# Altium footprint library WR-PHD_Socket Header.PcbLib: 279 footprints (part 17 of 18)
Each footprint in its own frame and in the unit in brackets; x right, y up, seen from the top. Pads: shape width x height; smd on the part's side, far side on the other; paste and mask are expansions set on the pad; w line width, h text height; cw(c..) or ccw(c..) is an arc to the next point about the centre after c.
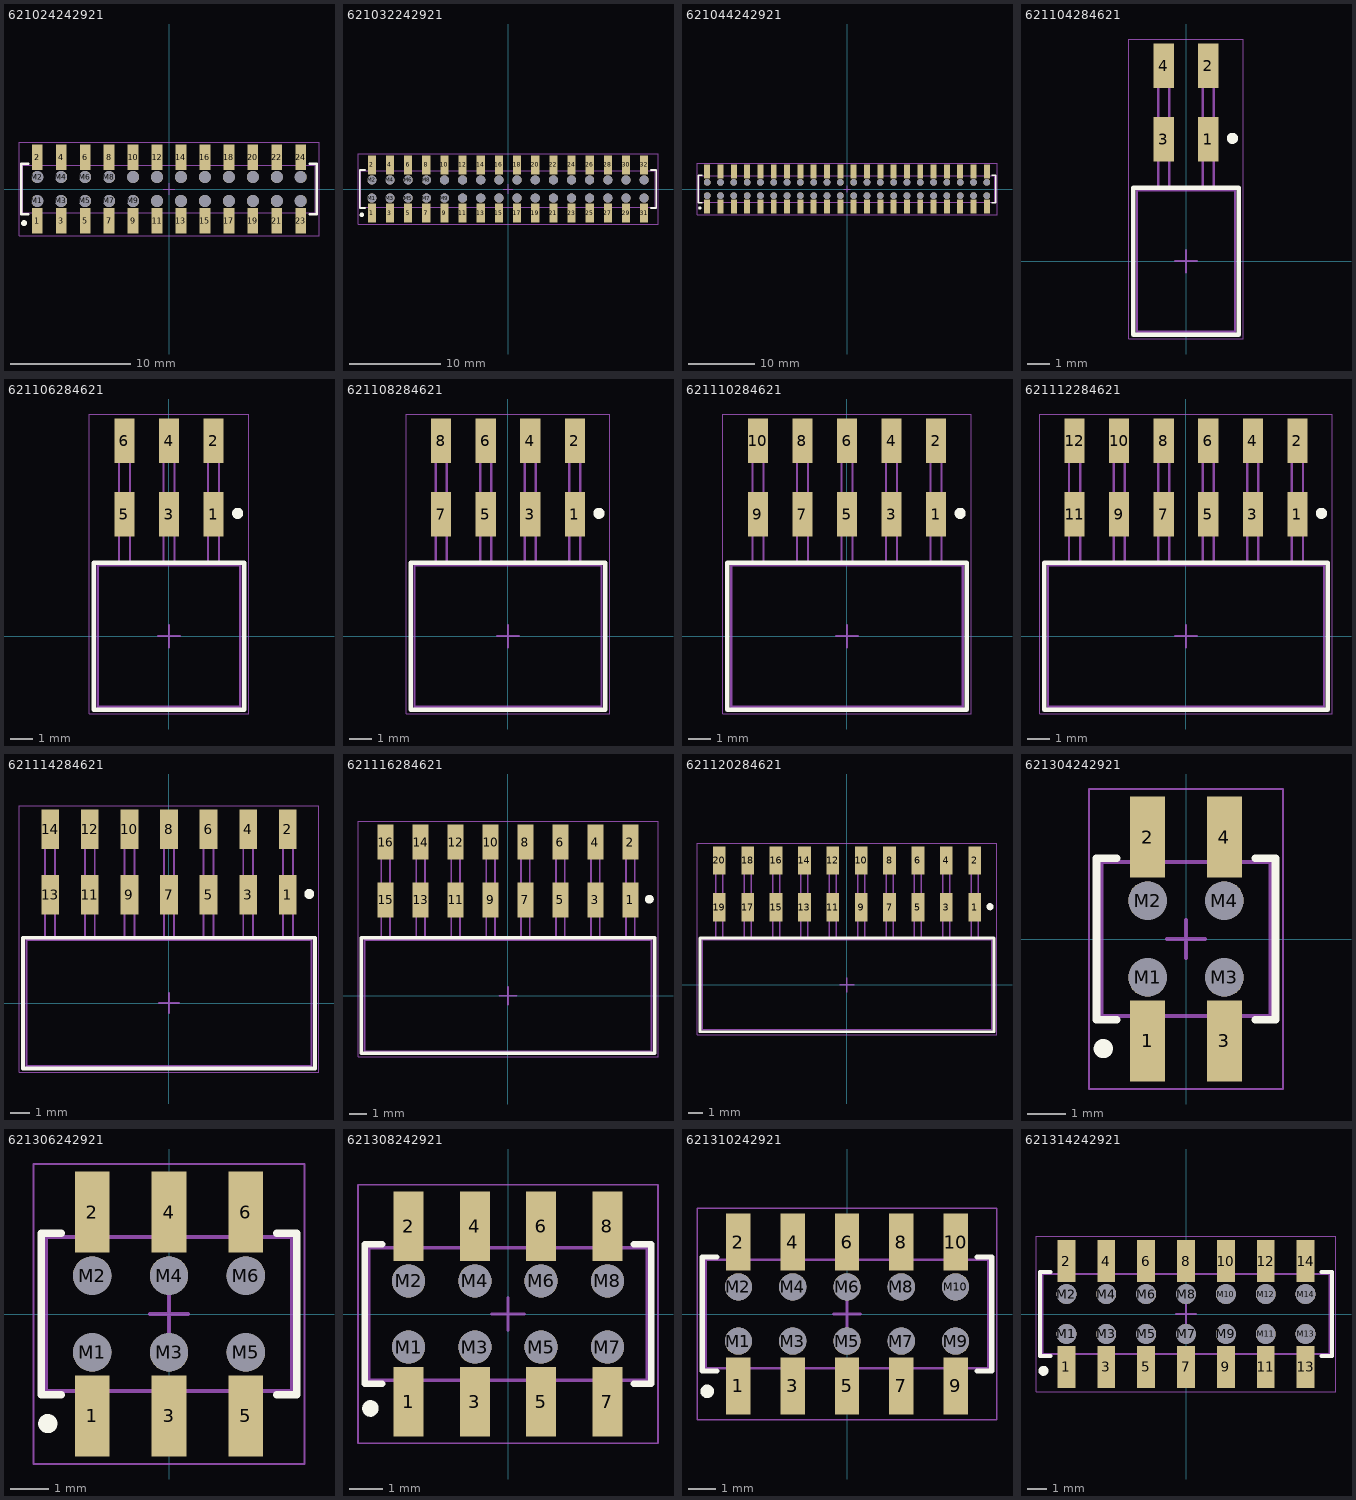
[diagram p16: the footprints below, top view; thin cyan lines are the x and y axes]

## 621024242921 [mm] "Socket Header, Pitch 2.00 mm, SMT, Vertical, dual row, 24p"
height 4.85
pads (48):
  rect 0.9x2.1 smd: 1(-11,-2.65) 2(-11,2.65) 3(-9,-2.65) 4(-9,2.65) 5(-7,-2.65) 6(-7,2.65) 7(-5,-2.65) 8(-5,2.65) 9(-3,-2.65) 10(-3,2.65) 11(-1,-2.65) 12(-1,2.65) 13(1,-2.65) 14(1,2.65) 15(3,-2.65) 16(3,2.65) 17(5,-2.65) 18(5,2.65) 19(7,-2.65) 20(7,2.65) 21(9,-2.65) 22(9,2.65) 23(11,-2.65) 24(11,2.65)
  round 1 hole 1 unplated: M1(-11,-1) M2(-11,1) M3(-9,-1) M4(-9,1) M5(-7,-1) M6(-7,1) M7(-5,-1) M8(-5,1) M9(-3,-1) M10(-3,1) M11(-1,-1) M12(-1,1) M13(1,-1) M14(1,1) M15(3,-1) M16(3,1) M17(5,-1) M18(5,1) M19(7,-1) M20(7,1) M21(9,-1) M22(9,1) M23(11,-1) M24(11,1)
Top Overlay:
  circle w0.25: c-12.1,-2.85 r0.125
  lines w0.2: -11.75,-2.1 -12.325,-2.1 -12.325,2.1 -11.75,2.1 ; 11.75,-2.1 12.325,-2.1 12.325,2.1 11.75,2.1
Top Component Outline:
  lines w0.1: -11.25,-2 -11.25,-3.1 -10.75,-3.1 -10.75,-2 ; -11.25,2 -11.25,3.1 -10.75,3.1 -10.75,2 ; -9.25,-2 -9.25,-3.1 -8.75,-3.1 -8.75,-2 ; -9.25,2 -9.25,3.1 -8.75,3.1 -8.75,2 ; -7.25,-2 -7.25,-3.1 -6.75,-3.1 -6.75,-2 ; -7.25,2 -7.25,3.1 -6.75,3.1 -6.75,2 ; -5.25,-2 -5.25,-3.1 -4.75,-3.1 -4.75,-2 ; -5.25,2 -5.25,3.1 -4.75,3.1 -4.75,2 ; -3.25,-2 -3.25,-3.1 -2.75,-3.1 -2.75,-2 ; -3.25,2 -3.25,3.1 -2.75,3.1 -2.75,2 ; -1.25,-2 -1.25,-3.1 -0.75,-3.1 -0.75,-2 ; -1.25,2 -1.25,3.1 -0.75,3.1 -0.75,2 ; 0.75,-2 0.75,-3.1 1.25,-3.1 1.25,-2 ; 0.75,2 0.75,3.1 1.25,3.1 1.25,2 ; 2.75,-2 2.75,-3.1 3.25,-3.1 3.25,-2 ; 2.75,2 2.75,3.1 3.25,3.1 3.25,2 ; 4.75,-2 4.75,-3.1 5.25,-3.1 5.25,-2 ; 4.75,2 4.75,3.1 5.25,3.1 5.25,2 ; 6.75,-2 6.75,-3.1 7.25,-3.1 7.25,-2 ; 6.75,2 6.75,3.1 7.25,3.1 7.25,2 ; 8.75,-2 8.75,-3.1 9.25,-3.1 9.25,-2 ; 8.75,2 8.75,3.1 9.25,3.1 9.25,2 ; 10.75,-2 10.75,-3.1 11.25,-3.1 11.25,-2 ; 10.75,2 10.75,3.1 11.25,3.1 11.25,2 ; -12.2,-2 12.2,-2 12.2,2 -12.2,2 -12.2,-2
Top Designator:
  text ".Designator" at -3.647,-0.357 h1
Top Courtyard:
  lines w0.05: -12.525,-3.9 -12.525,3.9 12.525,3.9 12.525,-3.9 -12.525,-3.9
Top Component Center:
  lines w0.1: -0.5,0 0.5,0 ; 0,-0.5 0,0.5
3D body "621024242921.stp": height 4.6, standoff 0, extent -12.25,-3.1 12.25,3.1

## 621032242921 [mm] "Socket Header, Pitch 2.00 mm, SMT, Vertical, dual row, 32p"
height 4.85
pads (64):
  rect 0.9x2.1 smd: 1(-15,-2.65) 2(-15,2.65) 3(-13,-2.65) 4(-13,2.65) 5(-11,-2.65) 6(-11,2.65) 7(-9,-2.65) 8(-9,2.65) 9(-7,-2.65) 10(-7,2.65) 11(-5,-2.65) 12(-5,2.65) 13(-3,-2.65) 14(-3,2.65) 15(-1,-2.65) 16(-1,2.65) 17(1,-2.65) 18(1,2.65) 19(3,-2.65) 20(3,2.65) 21(5,-2.65) 22(5,2.65) 23(7,-2.65) 24(7,2.65) 25(9,-2.65) 26(9,2.65) 27(11,-2.65) 28(11,2.65) 29(13,-2.65) 30(13,2.65) 31(15,-2.65) 32(15,2.65)
  round 1 hole 1 unplated: M1(-15,-1) M2(-15,1) M3(-13,-1) M4(-13,1) M5(-11,-1) M6(-11,1) M7(-9,-1) M8(-9,1) M9(-7,-1) M10(-7,1) M11(-5,-1) M12(-5,1) M13(-3,-1) M14(-3,1) M15(-1,-1) M16(-1,1) M17(1,-1) M18(1,1) M19(3,-1) M20(3,1) M21(5,-1) M22(5,1) M23(7,-1) M24(7,1) M25(9,-1) M26(9,1) M27(11,-1) M28(11,1) M29(13,-1) M30(13,1) M31(15,-1) M32(15,1)
Top Overlay:
  circle w0.25: c-16.1,-2.85 r0.125
  lines w0.2: -15.75,-2.1 -16.325,-2.1 -16.325,2.1 -15.75,2.1 ; 15.75,-2.1 16.325,-2.1 16.325,2.1 15.75,2.1
Top Component Outline:
  lines w0.1: -15.25,-2 -15.25,-3.1 -14.75,-3.1 -14.75,-2 ; -15.25,2 -15.25,3.1 -14.75,3.1 -14.75,2 ; -13.25,-2 -13.25,-3.1 -12.75,-3.1 -12.75,-2 ; -13.25,2 -13.25,3.1 -12.75,3.1 -12.75,2 ; -11.25,-2 -11.25,-3.1 -10.75,-3.1 -10.75,-2 ; -11.25,2 -11.25,3.1 -10.75,3.1 -10.75,2 ; -9.25,-2 -9.25,-3.1 -8.75,-3.1 -8.75,-2 ; -9.25,2 -9.25,3.1 -8.75,3.1 -8.75,2 ; -7.25,-2 -7.25,-3.1 -6.75,-3.1 -6.75,-2 ; -7.25,2 -7.25,3.1 -6.75,3.1 -6.75,2 ; -5.25,-2 -5.25,-3.1 -4.75,-3.1 -4.75,-2 ; -5.25,2 -5.25,3.1 -4.75,3.1 -4.75,2 ; -3.25,-2 -3.25,-3.1 -2.75,-3.1 -2.75,-2 ; -3.25,2 -3.25,3.1 -2.75,3.1 -2.75,2 ; -1.25,-2 -1.25,-3.1 -0.75,-3.1 -0.75,-2 ; -1.25,2 -1.25,3.1 -0.75,3.1 -0.75,2 ; 0.75,-2 0.75,-3.1 1.25,-3.1 1.25,-2 ; 0.75,2 0.75,3.1 1.25,3.1 1.25,2 ; 2.75,-2 2.75,-3.1 3.25,-3.1 3.25,-2 ; 2.75,2 2.75,3.1 3.25,3.1 3.25,2 ; 4.75,-2 4.75,-3.1 5.25,-3.1 5.25,-2 ; 4.75,2 4.75,3.1 5.25,3.1 5.25,2 ; 6.75,-2 6.75,-3.1 7.25,-3.1 7.25,-2 ; 6.75,2 6.75,3.1 7.25,3.1 7.25,2 ; 8.75,-2 8.75,-3.1 9.25,-3.1 9.25,-2 ; 8.75,2 8.75,3.1 9.25,3.1 9.25,2 ; 10.75,-2 10.75,-3.1 11.25,-3.1 11.25,-2 ; 10.75,2 10.75,3.1 11.25,3.1 11.25,2 ; 12.75,-2 12.75,-3.1 13.25,-3.1 13.25,-2 ; 12.75,2 12.75,3.1 13.25,3.1 13.25,2 ; 14.75,-2 14.75,-3.1 15.25,-3.1 15.25,-2 ; 14.75,2 14.75,3.1 15.25,3.1 15.25,2 ; -16.2,-2 16.2,-2 16.2,2 -16.2,2 -16.2,-2
Top Designator:
  text ".Designator" at -3.647,-0.357 h1
Top Courtyard:
  lines w0.05: -16.525,-3.9 -16.525,3.9 16.525,3.9 16.525,-3.9 -16.525,-3.9
Top Component Center:
  lines w0.1: -0.5,0 0.5,0 ; 0,-0.5 0,0.5
3D body "621032242921.stp": height 4.6, standoff 0, extent -16.25,-3.1 16.25,3.1

## 621044242921 [mm] "Socket Header, Pitch 2.00 mm, SMT, Vertical, dual row, 44p"
height 4.85
pads (88):
  rect 0.9x2.1 smd: 1(-21,-2.65) 2(-21,2.65) 3(-19,-2.65) 4(-19,2.65) 5(-17,-2.65) 6(-17,2.65) 7(-15,-2.65) 8(-15,2.65) 9(-13,-2.65) 10(-13,2.65) 11(-11,-2.65) 12(-11,2.65) 13(-9,-2.65) 14(-9,2.65) 15(-7,-2.65) 16(-7,2.65) 17(-5,-2.65) 18(-5,2.65) 19(-3,-2.65) 20(-3,2.65) 21(-1,-2.65) 22(-1,2.65) 23(1,-2.65) 24(1,2.65) 25(3,-2.65) 26(3,2.65) 27(5,-2.65) 28(5,2.65) 29(7,-2.65) 30(7,2.65) 31(9,-2.65) 32(9,2.65) 33(11,-2.65) 34(11,2.65) 35(13,-2.65) 36(13,2.65) 37(15,-2.65) 38(15,2.65) 39(17,-2.65) 40(17,2.65) 41(19,-2.65) 42(19,2.65) 43(21,-2.65) 44(21,2.65)
  round 1 hole 1 unplated: M1(-21,-1) M2(-21,1) M3(-19,-1) M4(-19,1) M5(-17,-1) M6(-17,1) M7(-15,-1) M8(-15,1) M9(-13,-1) M10(-13,1) M11(-11,-1) M12(-11,1) M13(-9,-1) M14(-9,1) M15(-7,-1) M16(-7,1) M17(-5,-1) M18(-5,1) M19(-3,-1) M20(-3,1) M21(-1,-1) M22(-1,1) M23(1,-1) M24(1,1) M25(3,-1) M26(3,1) M27(5,-1) M28(5,1) M29(7,-1) M30(7,1) M31(9,-1) M32(9,1) M33(11,-1) M34(11,1) M35(13,-1) M36(13,1) M37(15,-1) M38(15,1) M39(17,-1) M40(17,1) M41(19,-1) M42(19,1) M43(21,-1) M44(21,1)
Top Overlay:
  circle w0.25: c-22.1,-2.85 r0.125
  lines w0.2: -21.75,-2.1 -22.325,-2.1 -22.325,2.1 -21.75,2.1 ; 21.75,-2.1 22.325,-2.1 22.325,2.1 21.75,2.1
Top Component Outline:
  lines w0.1: -21.25,-2 -21.25,-3.1 -20.75,-3.1 -20.75,-2 ; -21.25,2 -21.25,3.1 -20.75,3.1 -20.75,2 ; -19.25,-2 -19.25,-3.1 -18.75,-3.1 -18.75,-2 ; -19.25,2 -19.25,3.1 -18.75,3.1 -18.75,2 ; -17.25,-2 -17.25,-3.1 -16.75,-3.1 -16.75,-2 ; -17.25,2 -17.25,3.1 -16.75,3.1 -16.75,2 ; -15.25,-2 -15.25,-3.1 -14.75,-3.1 -14.75,-2 ; -15.25,2 -15.25,3.1 -14.75,3.1 -14.75,2 ; -13.25,-2 -13.25,-3.1 -12.75,-3.1 -12.75,-2 ; -13.25,2 -13.25,3.1 -12.75,3.1 -12.75,2 ; -11.25,-2 -11.25,-3.1 -10.75,-3.1 -10.75,-2 ; -11.25,2 -11.25,3.1 -10.75,3.1 -10.75,2 ; -9.25,-2 -9.25,-3.1 -8.75,-3.1 -8.75,-2 ; -9.25,2 -9.25,3.1 -8.75,3.1 -8.75,2 ; -7.25,-2 -7.25,-3.1 -6.75,-3.1 -6.75,-2 ; -7.25,2 -7.25,3.1 -6.75,3.1 -6.75,2 ; -5.25,-2 -5.25,-3.1 -4.75,-3.1 -4.75,-2 ; -5.25,2 -5.25,3.1 -4.75,3.1 -4.75,2 ; -3.25,-2 -3.25,-3.1 -2.75,-3.1 -2.75,-2 ; -3.25,2 -3.25,3.1 -2.75,3.1 -2.75,2 ; -1.25,-2 -1.25,-3.1 -0.75,-3.1 -0.75,-2 ; -1.25,2 -1.25,3.1 -0.75,3.1 -0.75,2 ; 0.75,-2 0.75,-3.1 1.25,-3.1 1.25,-2 ; 0.75,2 0.75,3.1 1.25,3.1 1.25,2 ; 2.75,-2 2.75,-3.1 3.25,-3.1 3.25,-2 ; 2.75,2 2.75,3.1 3.25,3.1 3.25,2 ; 4.75,-2 4.75,-3.1 5.25,-3.1 5.25,-2 ; 4.75,2 4.75,3.1 5.25,3.1 5.25,2 ; 6.75,-2 6.75,-3.1 7.25,-3.1 7.25,-2 ; 6.75,2 6.75,3.1 7.25,3.1 7.25,2 ; 8.75,-2 8.75,-3.1 9.25,-3.1 9.25,-2 ; 8.75,2 8.75,3.1 9.25,3.1 9.25,2 ; 10.75,-2 10.75,-3.1 11.25,-3.1 11.25,-2 ; 10.75,2 10.75,3.1 11.25,3.1 11.25,2 ; 12.75,-2 12.75,-3.1 13.25,-3.1 13.25,-2 ; 12.75,2 12.75,3.1 13.25,3.1 13.25,2 ; 14.75,-2 14.75,-3.1 15.25,-3.1 15.25,-2 ; 14.75,2 14.75,3.1 15.25,3.1 15.25,2 ; 16.75,-2 16.75,-3.1 17.25,-3.1 17.25,-2 ; 16.75,2 16.75,3.1 17.25,3.1 17.25,2 ; 18.75,-2 18.75,-3.1 19.25,-3.1 19.25,-2 ; 18.75,2 18.75,3.1 19.25,3.1 19.25,2 ; 20.75,-2 20.75,-3.1 21.25,-3.1 21.25,-2 ; 20.75,2 20.75,3.1 21.25,3.1 21.25,2 ; -22.2,-2 22.2,-2 22.2,2 -22.2,2 -22.2,-2
Top Designator:
  text ".Designator" at -3.647,-0.357 h1
Top Courtyard:
  lines w0.05: -22.525,-3.9 -22.525,3.9 22.525,3.9 22.525,-3.9 -22.525,-3.9
Top Component Center:
  lines w0.1: -0.5,0 0.5,0 ; 0,-0.5 0,0.5
3D body "621044242921.stp": height 4.6, standoff 0, extent -22.25,-3.1 22.25,3.1

## 621104284621 [mm] "Socket Header, Pitch 2.00 mm, SMT, Angled, dual row, 4p"
height 4.15
pads (4):
  rect 0.9x2 smd: 1(1,5.475) 2(1,8.775) 3(-1,5.475) 4(-1,8.775)
Top Overlay:
  circle w0.25: c2.084,5.514 r0.125
  lines w0.2: -2.375,-3.3 -2.375,3.3 2.375,3.3 2.375,-3.3 -2.375,-3.3
Top Component Outline:
  lines w0.1: -1.25,3.175 -1.25,9.275 -0.75,9.275 -0.75,3.175 ; -1.25,5.975 -0.75,5.975 ; 0.75,3.175 0.75,9.275 1.25,9.275 1.25,3.175 ; 0.75,5.975 1.25,5.975 ; -2.2,-3.175 2.2,-3.175 2.2,3.175 -2.2,3.175 -2.2,-3.175
Top Designator:
  text ".Designator" at -3.647,-0.357 h1
Top Courtyard:
  lines w0.05: -2.575,-3.5 -2.575,9.975 2.575,9.975 2.575,-3.5 -2.575,-3.5
Top Component Center:
  lines w0.1: -0.5,0 0.5,0 ; 0,-0.5 0,0.5
3D body "621104284621.stp": height 4.05, standoff 0.05, extent -2.15,-3.175 2.15,9.275

## 621106284621 [mm] "Socket Header, Pitch 2.00 mm, SMT, Angled, dual row, 6p"
height 4.15
pads (6):
  rect 0.9x2 smd: 1(2,5.475) 2(2,8.775) 3(0,5.475) 4(0,8.775) 5(-2,5.475) 6(-2,8.775)
Top Overlay:
  circle w0.25: c3.084,5.514 r0.125
  lines w0.2: -3.375,-3.3 -3.375,3.3 3.375,3.3 3.375,-3.3 -3.375,-3.3
Top Component Outline:
  lines w0.1: -2.25,3.175 -2.25,9.275 -1.75,9.275 -1.75,3.175 ; -2.25,5.975 -1.75,5.975 ; -0.25,3.175 -0.25,9.275 0.25,9.275 0.25,3.175 ; -0.25,5.975 0.25,5.975 ; 1.75,3.175 1.75,9.275 2.25,9.275 2.25,3.175 ; 1.75,5.975 2.25,5.975 ; -3.2,-3.175 3.2,-3.175 3.2,3.175 -3.2,3.175 -3.2,-3.175
Top Designator:
  text ".Designator" at -3.647,-0.357 h1
Top Courtyard:
  lines w0.05: -3.575,-3.5 -3.575,9.975 3.575,9.975 3.575,-3.5 -3.575,-3.5
Top Component Center:
  lines w0.1: -0.5,0 0.5,0 ; 0,-0.5 0,0.5
3D body "621106284621.stp": height 4.05, standoff 0.05, extent -3.15,-3.175 3.15,9.275

## 621108284621 [mm] "Socket Header, Pitch 2.00 mm, SMT, Angled, dual row, 8p"
height 4.15
pads (8):
  rect 0.9x2 smd: 1(3,5.475) 2(3,8.775) 3(1,5.475) 4(1,8.775) 5(-1,5.475) 6(-1,8.775) 7(-3,5.475) 8(-3,8.775)
Top Overlay:
  circle w0.25: c4.084,5.514 r0.125
  lines w0.2: -4.375,-3.3 -4.375,3.3 4.375,3.3 4.375,-3.3 -4.375,-3.3
Top Component Outline:
  lines w0.1: -3.25,3.175 -3.25,9.275 -2.75,9.275 -2.75,3.175 ; -3.25,5.975 -2.75,5.975 ; -1.25,3.175 -1.25,9.275 -0.75,9.275 -0.75,3.175 ; -1.25,5.975 -0.75,5.975 ; 0.75,3.175 0.75,9.275 1.25,9.275 1.25,3.175 ; 0.75,5.975 1.25,5.975 ; 2.75,3.175 2.75,9.275 3.25,9.275 3.25,3.175 ; 2.75,5.975 3.25,5.975 ; -4.2,-3.175 4.2,-3.175 4.2,3.175 -4.2,3.175 -4.2,-3.175
Top Designator:
  text ".Designator" at -3.647,-0.357 h1
Top Courtyard:
  lines w0.05: -4.575,-3.5 -4.575,9.975 4.575,9.975 4.575,-3.5 -4.575,-3.5
Top Component Center:
  lines w0.1: -0.5,0 0.5,0 ; 0,-0.5 0,0.5
3D body "621108284621.stp": height 4.05, standoff 0.05, extent -4.15,-3.175 4.15,9.275

## 621110284621 [mm] "Socket Header, Pitch 2.00 mm, SMT, Angled, dual row, 10p"
height 4.15
pads (10):
  rect 0.9x2 smd: 1(4,5.475) 2(4,8.775) 3(2,5.475) 4(2,8.775) 5(0,5.475) 6(0,8.775) 7(-2,5.475) 8(-2,8.775) 9(-4,5.475) 10(-4,8.775)
Top Overlay:
  circle w0.25: c5.084,5.514 r0.125
  lines w0.2: -5.375,-3.3 -5.375,3.3 5.375,3.3 5.375,-3.3 -5.375,-3.3
Top Component Outline:
  lines w0.1: -4.25,3.175 -4.25,9.275 -3.75,9.275 -3.75,3.175 ; -4.25,5.975 -3.75,5.975 ; -2.25,3.175 -2.25,9.275 -1.75,9.275 -1.75,3.175 ; -2.25,5.975 -1.75,5.975 ; -0.25,3.175 -0.25,9.275 0.25,9.275 0.25,3.175 ; -0.25,5.975 0.25,5.975 ; 1.75,3.175 1.75,9.275 2.25,9.275 2.25,3.175 ; 1.75,5.975 2.25,5.975 ; 3.75,3.175 3.75,9.275 4.25,9.275 4.25,3.175 ; 3.75,5.975 4.25,5.975 ; -5.2,-3.175 -5.2,3.175 5.2,3.175 5.2,-3.175 -5.2,-3.175
Top Designator:
  text ".Designator" at -3.647,-0.357 h1
Top Courtyard:
  lines w0.05: -5.575,-3.5 -5.575,9.975 5.575,9.975 5.575,-3.5 -5.575,-3.5
Top Component Center:
  lines w0.1: -0.5,0 0.5,0 ; 0,-0.5 0,0.5
3D body "621110284621.stp": height 4.05, standoff 0.05, extent -5.15,-3.175 5.15,9.275

## 621112284621 [mm] "Socket Header, Pitch 2.00 mm, SMT, Angled, dual row, 12p"
height 4.15
pads (12):
  rect 0.9x2 smd: 1(5,5.475) 2(5,8.775) 3(3,5.475) 4(3,8.775) 5(1,5.475) 6(1,8.775) 7(-1,5.475) 8(-1,8.775) 9(-3,5.475) 10(-3,8.775) 11(-5,5.475) 12(-5,8.775)
Top Overlay:
  circle w0.25: c6.084,5.514 r0.125
  lines w0.2: -6.375,-3.3 -6.375,3.3 6.375,3.3 6.375,-3.3 -6.375,-3.3
Top Component Outline:
  lines w0.1: -5.25,3.175 -5.25,9.275 -4.75,9.275 -4.75,3.175 ; -5.25,5.975 -4.75,5.975 ; -3.25,3.175 -3.25,9.275 -2.75,9.275 -2.75,3.175 ; -3.25,5.975 -2.75,5.975 ; -1.25,3.175 -1.25,9.275 -0.75,9.275 -0.75,3.175 ; -1.25,5.975 -0.75,5.975 ; 0.75,3.175 0.75,9.275 1.25,9.275 1.25,3.175 ; 0.75,5.975 1.25,5.975 ; 2.75,3.175 2.75,9.275 3.25,9.275 3.25,3.175 ; 2.75,5.975 3.25,5.975 ; 4.75,3.175 4.75,9.275 5.25,9.275 5.25,3.175 ; 4.75,5.975 5.25,5.975 ; -6.2,-3.175 -6.2,3.175 6.2,3.175 6.2,-3.175 -6.2,-3.175
Top Designator:
  text ".Designator" at -3.647,-0.357 h1
Top Courtyard:
  lines w0.05: -6.575,-3.5 -6.575,9.975 6.575,9.975 6.575,-3.5 -6.575,-3.5
Top Component Center:
  lines w0.1: -0.5,0 0.5,0 ; 0,-0.5 0,0.5
3D body "621112284621.stp": height 4.05, standoff 0.05, extent -6.15,-3.175 6.15,9.275

## 621114284621 [mm] "Socket Header, Pitch 2.00 mm, SMT, Angled, dual row, 14p"
height 4.15
pads (14):
  rect 0.9x2 smd: 1(6,5.475) 2(6,8.775) 3(4,5.475) 4(4,8.775) 5(2,5.475) 6(2,8.775) 7(0,5.475) 8(0,8.775) 9(-2,5.475) 10(-2,8.775) 11(-4,5.475) 12(-4,8.775) 13(-6,5.475) 14(-6,8.775)
Top Overlay:
  circle w0.25: c7.084,5.514 r0.125
  lines w0.2: -7.375,-3.3 -7.375,3.3 7.375,3.3 7.375,-3.3 -7.375,-3.3
Top Component Outline:
  lines w0.1: -6.25,3.175 -6.25,9.275 -5.75,9.275 -5.75,3.175 ; -6.25,5.975 -5.75,5.975 ; -4.25,3.175 -4.25,9.275 -3.75,9.275 -3.75,3.175 ; -4.25,5.975 -3.75,5.975 ; -2.25,3.175 -2.25,9.275 -1.75,9.275 -1.75,3.175 ; -2.25,5.975 -1.75,5.975 ; -0.25,3.175 -0.25,9.275 0.25,9.275 0.25,3.175 ; -0.25,5.975 0.25,5.975 ; 1.75,3.175 1.75,9.275 2.25,9.275 2.25,3.175 ; 1.75,5.975 2.25,5.975 ; 3.75,3.175 3.75,9.275 4.25,9.275 4.25,3.175 ; 3.75,5.975 4.25,5.975 ; 5.75,3.175 5.75,9.275 6.25,9.275 6.25,3.175 ; 5.75,5.975 6.25,5.975 ; -7.2,-3.175 -7.2,3.175 7.2,3.175 7.2,-3.175 -7.2,-3.175
Top Designator:
  text ".Designator" at -3.647,-0.357 h1
Top Courtyard:
  lines w0.05: -7.575,-3.5 -7.575,9.975 7.575,9.975 7.575,-3.5 -7.575,-3.5
Top Component Center:
  lines w0.1: -0.5,0 0.5,0 ; 0,-0.5 0,0.5
3D body "621114284621.stp": height 4.05, standoff 0.05, extent -7.15,-3.175 7.15,9.275

## 621116284621 [mm] "Socket Header, Pitch 2.00 mm, SMT, Angled, dual row, 16p"
height 4.15
pads (16):
  rect 0.9x2 smd: 1(7,5.475) 2(7,8.775) 3(5,5.475) 4(5,8.775) 5(3,5.475) 6(3,8.775) 7(1,5.475) 8(1,8.775) 9(-1,5.475) 10(-1,8.775) 11(-3,5.475) 12(-3,8.775) 13(-5,5.475) 14(-5,8.775) 15(-7,5.475) 16(-7,8.775)
Top Overlay:
  circle w0.25: c8.084,5.514 r0.125
  lines w0.2: -8.375,-3.3 -8.375,3.3 8.375,3.3 8.375,-3.3 -8.375,-3.3
Top Component Outline:
  lines w0.1: -7.25,3.175 -7.25,9.275 -6.75,9.275 -6.75,3.175 ; -7.25,5.975 -6.75,5.975 ; -5.25,3.175 -5.25,9.275 -4.75,9.275 -4.75,3.175 ; -5.25,5.975 -4.75,5.975 ; -3.25,3.175 -3.25,9.275 -2.75,9.275 -2.75,3.175 ; -3.25,5.975 -2.75,5.975 ; -1.25,3.175 -1.25,9.275 -0.75,9.275 -0.75,3.175 ; -1.25,5.975 -0.75,5.975 ; 0.75,3.175 0.75,9.275 1.25,9.275 1.25,3.175 ; 0.75,5.975 1.25,5.975 ; 2.75,3.175 2.75,9.275 3.25,9.275 3.25,3.175 ; 2.75,5.975 3.25,5.975 ; 4.75,3.175 4.75,9.275 5.25,9.275 5.25,3.175 ; 4.75,5.975 5.25,5.975 ; 6.75,3.175 6.75,9.275 7.25,9.275 7.25,3.175 ; 6.75,5.975 7.25,5.975 ; -8.2,-3.175 -8.2,3.175 8.2,3.175 8.2,-3.175 -8.2,-3.175
Top Designator:
  text ".Designator" at -3.647,-0.357 h1
Top Courtyard:
  lines w0.05: -8.575,-3.5 -8.575,9.975 8.575,9.975 8.575,-3.5 -8.575,-3.5
Top Component Center:
  lines w0.1: -0.5,0 0.5,0 ; 0,-0.5 0,0.5
3D body "621116284621.stp": height 4.05, standoff 0.05, extent -8.15,-3.175 8.15,9.275

## 621120284621 [mm] "Socket Header, Pitch 2.00 mm, SMT, Angled, dual row, 20p"
height 4.15
pads (20):
  rect 0.9x2 smd: 1(9,5.475) 2(9,8.775) 3(7,5.475) 4(7,8.775) 5(5,5.475) 6(5,8.775) 7(3,5.475) 8(3,8.775) 9(1,5.475) 10(1,8.775) 11(-1,5.475) 12(-1,8.775) 13(-3,5.475) 14(-3,8.775) 15(-5,5.475) 16(-5,8.775) 17(-7,5.475) 18(-7,8.775) 19(-9,5.475) 20(-9,8.775)
Top Overlay:
  circle w0.25: c10.084,5.514 r0.125
  lines w0.2: -10.375,-3.3 -10.375,3.3 10.375,3.3 10.375,-3.3 -10.375,-3.3
Top Component Outline:
  lines w0.1: -9.25,3.175 -9.25,9.275 -8.75,9.275 -8.75,3.175 ; -9.25,5.975 -8.75,5.975 ; -7.25,3.175 -7.25,9.275 -6.75,9.275 -6.75,3.175 ; -7.25,5.975 -6.75,5.975 ; -5.25,3.175 -5.25,9.275 -4.75,9.275 -4.75,3.175 ; -5.25,5.975 -4.75,5.975 ; -3.25,3.175 -3.25,9.275 -2.75,9.275 -2.75,3.175 ; -3.25,5.975 -2.75,5.975 ; -1.25,3.175 -1.25,9.275 -0.75,9.275 -0.75,3.175 ; -1.25,5.975 -0.75,5.975 ; 0.75,3.175 0.75,9.275 1.25,9.275 1.25,3.175 ; 0.75,5.975 1.25,5.975 ; 2.75,3.175 2.75,9.275 3.25,9.275 3.25,3.175 ; 2.75,5.975 3.25,5.975 ; 4.75,3.175 4.75,9.275 5.25,9.275 5.25,3.175 ; 4.75,5.975 5.25,5.975 ; 6.75,3.175 6.75,9.275 7.25,9.275 7.25,3.175 ; 6.75,5.975 7.25,5.975 ; 8.75,3.175 8.75,9.275 9.25,9.275 9.25,3.175 ; 8.75,5.975 9.25,5.975 ; -10.2,-3.175 -10.2,3.175 10.2,3.175 10.2,-3.175 -10.2,-3.175
Top Designator:
  text ".Designator" at -3.647,-0.357 h1
Top Courtyard:
  lines w0.05: -10.575,-3.5 -10.575,9.975 10.575,9.975 10.575,-3.5 -10.575,-3.5
Top Component Center:
  lines w0.1: -0.5,0 0.5,0 ; 0,-0.5 0,0.5
3D body "621120284621.stp": height 4.05, standoff 0.05, extent -10.15,-3.175 10.15,9.275

## 621304242921 [mm] "Socket Header, Pitch 2.00 mm, SMT, Vertical, dual row, 4p"
height 4.85
pads (8):
  rect 0.9x2.1 smd: 1(-1,-2.65) 2(-1,2.65) 3(1,-2.65) 4(1,2.65)
  round 1 hole 1 unplated: M1(-1,-1) M2(-1,1) M3(1,-1) M4(1,1)
Top Overlay:
  circle w0.25: c-2.15,-2.85 r0.125
  lines w0.2: -1.8,-2.1 -2.325,-2.1 -2.325,2.1 -1.8,2.1 ; 1.8,-2.1 2.325,-2.1 2.325,2.1 1.8,2.1
Top Component Outline:
  lines w0.1: -1.25,-2 -1.25,-3.1 -0.75,-3.1 -0.75,-2 ; -1.25,2 -1.25,3.1 -0.75,3.1 -0.75,2 ; 0.75,-2 0.75,-3.1 1.25,-3.1 1.25,-2 ; 0.75,2 0.75,3.1 1.25,3.1 1.25,2 ; -2.2,-2 2.2,-2 2.2,2 -2.2,2 -2.2,-2
Top Designator:
  text ".Designator" at -3.647,-0.357 h1
Top Courtyard:
  lines w0.05: -2.525,-3.9 -2.525,3.9 2.525,3.9 2.525,-3.9 -2.525,-3.9
Top Component Center:
  lines w0.1: -0.5,0 0.5,0 ; 0,-0.5 0,0.5
3D body "621304242921.stp": height 4.6, standoff 0, extent -2.25,-3.1 2.25,3.1

## 621306242921 [mm] "Socket Header, Pitch 2.00 mm, SMT, Vertical, dual row, 6p"
height 4.85
pads (12):
  rect 0.9x2.1 smd: 1(-2,-2.65) 2(-2,2.65) 3(0,-2.65) 4(0,2.65) 5(2,-2.65) 6(2,2.65)
  round 1 hole 1 unplated: M1(-2,-1) M2(-2,1) M3(0,-1) M4(0,1) M5(2,-1) M6(2,1)
Top Overlay:
  circle w0.25: c-3.15,-2.85 r0.125
  lines w0.2: -2.8,-2.1 -3.325,-2.1 -3.325,2.1 -2.8,2.1 ; 2.8,-2.1 3.325,-2.1 3.325,2.1 2.8,2.1
Top Component Outline:
  lines w0.1: -2.25,-2 -2.25,-3.1 -1.75,-3.1 -1.75,-2 ; -2.25,2 -2.25,3.1 -1.75,3.1 -1.75,2 ; -0.25,-2 -0.25,-3.1 0.25,-3.1 0.25,-2 ; -0.25,2 -0.25,3.1 0.25,3.1 0.25,2 ; 1.75,-2 1.75,-3.1 2.25,-3.1 2.25,-2 ; 1.75,2 1.75,3.1 2.25,3.1 2.25,2 ; -3.2,-2 -3.2,2 3.2,2 3.2,-2 -3.2,-2
Top Designator:
  text ".Designator" at -3.647,-0.357 h1
Top Courtyard:
  lines w0.05: -3.525,-3.9 3.525,-3.9 3.525,3.9 -3.525,3.9 -3.525,-3.9
Top Component Center:
  lines w0.1: -0.5,0 0.5,0 ; 0,-0.5 0,0.5
3D body "621306242921.stp": height 4.6, standoff 0, extent -3.25,-3.1 3.25,3.1

## 621308242921 [mm] "Socket Header, Pitch 2.00 mm, SMT, Vertical, dual row, 8p"
height 4.85
pads (16):
  rect 0.9x2.1 smd: 1(-3,-2.65) 2(-3,2.65) 3(-1,-2.65) 4(-1,2.65) 5(1,-2.65) 6(1,2.65) 7(3,-2.65) 8(3,2.65)
  round 1 hole 1 unplated: M1(-3,-1) M2(-3,1) M3(-1,-1) M4(-1,1) M5(1,-1) M6(1,1) M7(3,-1) M8(3,1)
Top Overlay:
  circle w0.25: c-4.15,-2.85 r0.125
  lines w0.2: -3.8,-2.1 -4.325,-2.1 -4.325,2.1 -3.8,2.1 ; 3.8,-2.1 4.325,-2.1 4.325,2.1 3.8,2.1
Top Component Outline:
  lines w0.1: -3.25,-2 -3.25,-3.1 -2.75,-3.1 -2.75,-2 ; -3.25,2 -3.25,3.1 -2.75,3.1 -2.75,2 ; -1.25,-2 -1.25,-3.1 -0.75,-3.1 -0.75,-2 ; -1.25,2 -1.25,3.1 -0.75,3.1 -0.75,2 ; 0.75,-2 0.75,-3.1 1.25,-3.1 1.25,-2 ; 0.75,2 0.75,3.1 1.25,3.1 1.25,2 ; 2.75,-2 2.75,-3.1 3.25,-3.1 3.25,-2 ; 2.75,2 2.75,3.1 3.25,3.1 3.25,2 ; -4.2,-2 4.2,-2 4.2,2 -4.2,2 -4.2,-2
Top Designator:
  text ".Designator" at -3.647,-0.357 h1
Top Courtyard:
  lines w0.05: -4.525,-3.9 -4.525,3.9 4.525,3.9 4.525,-3.9 -4.525,-3.9
Top Component Center:
  lines w0.1: -0.5,0 0.5,0 ; 0,-0.5 0,0.5
3D body "621308242921.stp": height 4.6, standoff 0, extent -4.25,-3.1 4.25,3.1

## 621310242921 [mm] "Socket Header, Pitch 2.00 mm, SMT, Vertical, dual row, 10p"
height 4.85
pads (20):
  rect 0.9x2.1 smd: 1(-4,-2.65) 2(-4,2.65) 3(-2,-2.65) 4(-2,2.65) 5(0,-2.65) 6(0,2.65) 7(2,-2.65) 8(2,2.65) 9(4,-2.65) 10(4,2.65)
  round 1 hole 1 unplated: M1(-4,-1) M2(-4,1) M3(-2,-1) M4(-2,1) M5(0,-1) M6(0,1) M7(2,-1) M8(2,1) M9(4,-1) M10(4,1)
Top Overlay:
  circle w0.25: c-5.15,-2.85 r0.125
  lines w0.2: -4.8,-2.1 -5.325,-2.1 -5.325,2.1 -4.8,2.1 ; 4.8,-2.1 5.325,-2.1 5.325,2.1 4.8,2.1
Top Component Outline:
  lines w0.1: -4.25,-2 -4.25,-3.1 -3.75,-3.1 -3.75,-2 ; -4.25,2 -4.25,3.1 -3.75,3.1 -3.75,2 ; -2.25,-2 -2.25,-3.1 -1.75,-3.1 -1.75,-2 ; -2.25,2 -2.25,3.1 -1.75,3.1 -1.75,2 ; -0.25,-2 -0.25,-3.1 0.25,-3.1 0.25,-2 ; -0.25,2 -0.25,3.1 0.25,3.1 0.25,2 ; 1.75,-2 1.75,-3.1 2.25,-3.1 2.25,-2 ; 1.75,2 1.75,3.1 2.25,3.1 2.25,2 ; 3.75,-2 3.75,-3.1 4.25,-3.1 4.25,-2 ; 3.75,2 3.75,3.1 4.25,3.1 4.25,2 ; -5.2,-2 5.2,-2 5.2,2 -5.2,2 -5.2,-2
Top Designator:
  text ".Designator" at -3.647,-0.357 h1
Top Courtyard:
  lines w0.05: -5.525,-3.9 -5.525,3.9 5.525,3.9 5.525,-3.9 -5.525,-3.9
Top Component Center:
  lines w0.1: -0.5,0 0.5,0 ; 0,-0.5 0,0.5
3D body "621310242921.stp": height 4.6, standoff 0, extent -5.25,-3.1 5.25,3.1

## 621314242921 [mm] "Socket Header, Pitch 2.00 mm, SMT, Vertical, dual row, 14p"
height 4.85
pads (28):
  rect 0.9x2.1 smd: 1(-6,-2.65) 2(-6,2.65) 3(-4,-2.65) 4(-4,2.65) 5(-2,-2.65) 6(-2,2.65) 7(0,-2.65) 8(0,2.65) 9(2,-2.65) 10(2,2.65) 11(4,-2.65) 12(4,2.65) 13(6,-2.65) 14(6,2.65)
  round 1 hole 1 unplated: M1(-6,-1) M2(-6,1) M3(-4,-1) M4(-4,1) M5(-2,-1) M6(-2,1) M7(0,-1) M8(0,1) M9(2,-1) M10(2,1) M11(4,-1) M12(4,1) M13(6,-1) M14(6,1)
Top Overlay:
  circle w0.25: c-7.15,-2.85 r0.125
  lines w0.2: -6.8,-2.1 -7.325,-2.1 -7.325,2.1 -6.8,2.1 ; 6.8,-2.1 7.325,-2.1 7.325,2.1 6.8,2.1
Top Component Outline:
  lines w0.1: -6.25,-2 -6.25,-3.1 -5.75,-3.1 -5.75,-2 ; -6.25,2 -6.25,3.1 -5.75,3.1 -5.75,2 ; -4.25,-2 -4.25,-3.1 -3.75,-3.1 -3.75,-2 ; -4.25,2 -4.25,3.1 -3.75,3.1 -3.75,2 ; -2.25,-2 -2.25,-3.1 -1.75,-3.1 -1.75,-2 ; -2.25,2 -2.25,3.1 -1.75,3.1 -1.75,2 ; -0.25,-2 -0.25,-3.1 0.25,-3.1 0.25,-2 ; -0.25,2 -0.25,3.1 0.25,3.1 0.25,2 ; 1.75,-2 1.75,-3.1 2.25,-3.1 2.25,-2 ; 1.75,2 1.75,3.1 2.25,3.1 2.25,2 ; 3.75,-2 3.75,-3.1 4.25,-3.1 4.25,-2 ; 3.75,2 3.75,3.1 4.25,3.1 4.25,2 ; 5.75,-2 5.75,-3.1 6.25,-3.1 6.25,-2 ; 5.75,2 5.75,3.1 6.25,3.1 6.25,2 ; -7.2,-2 7.2,-2 7.2,2 -7.2,2 -7.2,-2
Top Designator:
  text ".Designator" at -3.647,-0.357 h1
Top Courtyard:
  lines w0.05: -7.525,-3.9 -7.525,3.9 7.525,3.9 7.525,-3.9 -7.525,-3.9
Top Component Center:
  lines w0.1: -0.5,0 0.5,0 ; 0,-0.5 0,0.5
3D body "621314242921.stp": height 4.6, standoff 0, extent -7.25,-3.1 7.25,3.1